# Altium footprint library KYCON_STX-3000.PcbLib: 1 footprints
Each footprint in its own frame and in the unit in brackets; x right, y up, seen from the top. Pads: shape width x height; smd on the part's side, far side on the other; paste and mask are expansions set on the pad; w line width, h text height; cw(c..) or ccw(c..) is an arc to the next point about the centre after c.
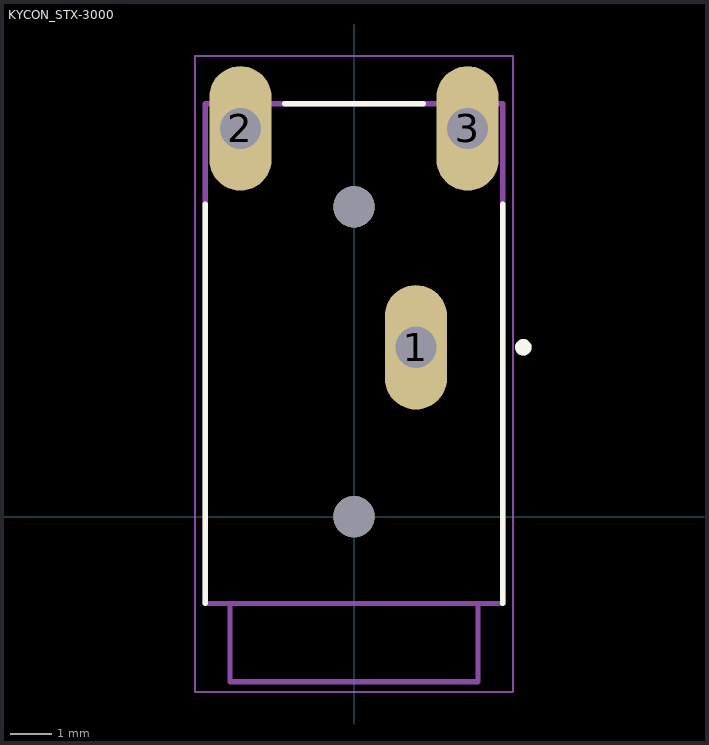
[diagram p0: the footprint, top view; thin cyan lines are the x and y axes]

## KYCON_STX-3000 [mm]
height 5.7
pads (5):
  oval 1.508x3.016 hole 1 square mask+0.102: 1(1.5,4.1) 2(-2.75,9.4) 3(2.75,9.4)
  round 1 hole 1 unplated mask+0: ""(0,0) ""(0,7.5)
Top Overlay:
  circle w0.2: c4.1,4.1 r0.1
  lines w0.127: -3.6,-2.1 -3.6,7.572 ; -1.676,10 1.676,10 ; 3.6,-2.1 3.6,7.572
Assembly Top:
  circle w0.2: c4.1,4.1 r0.1
  lines w0.127: -3,-2.1 -3,-4 3,-4 3,-2.1 ; -3,-2.1 -3.6,-2.1 -3.6,10 3.6,10 3.6,-2.1 3,-2.1 ; -3,-2.1 3,-2.1
Courtyard Top:
  lines w0.05: -3.85,-4.25 -3.85,11.158 3.85,11.158 3.85,-4.25 -3.85,-4.25